# Altium schematic symbol library WE-PD2_7850.SchLib: 1 symbol
Pins are listed as number, name and electrical type; pins without a type are passive.

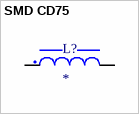
[diagram p0: symbol SMD CD75]

## SMD CD75
designator L?
SMD CD75 7.8x7.8x5; MF: {'manufacturer': u'W\xfcrth Elektronik'}; MP: 744775122; Package: None; Price: None; Value: *; Availability: Unavailable
footprint WE-PD2_7850
pins: 1, 2